# Altium footprint library UCP.PcbLib: 222 footprints (part 3 of 14)
Each footprint in its own frame and in the unit in brackets; x right, y up, seen from the top. Pads: shape width x height; smd on the part's side, far side on the other; paste and mask are expansions set on the pad; w line width, h text height; cw(c..) or ccw(c..) is an arc to the next point about the centre after c.
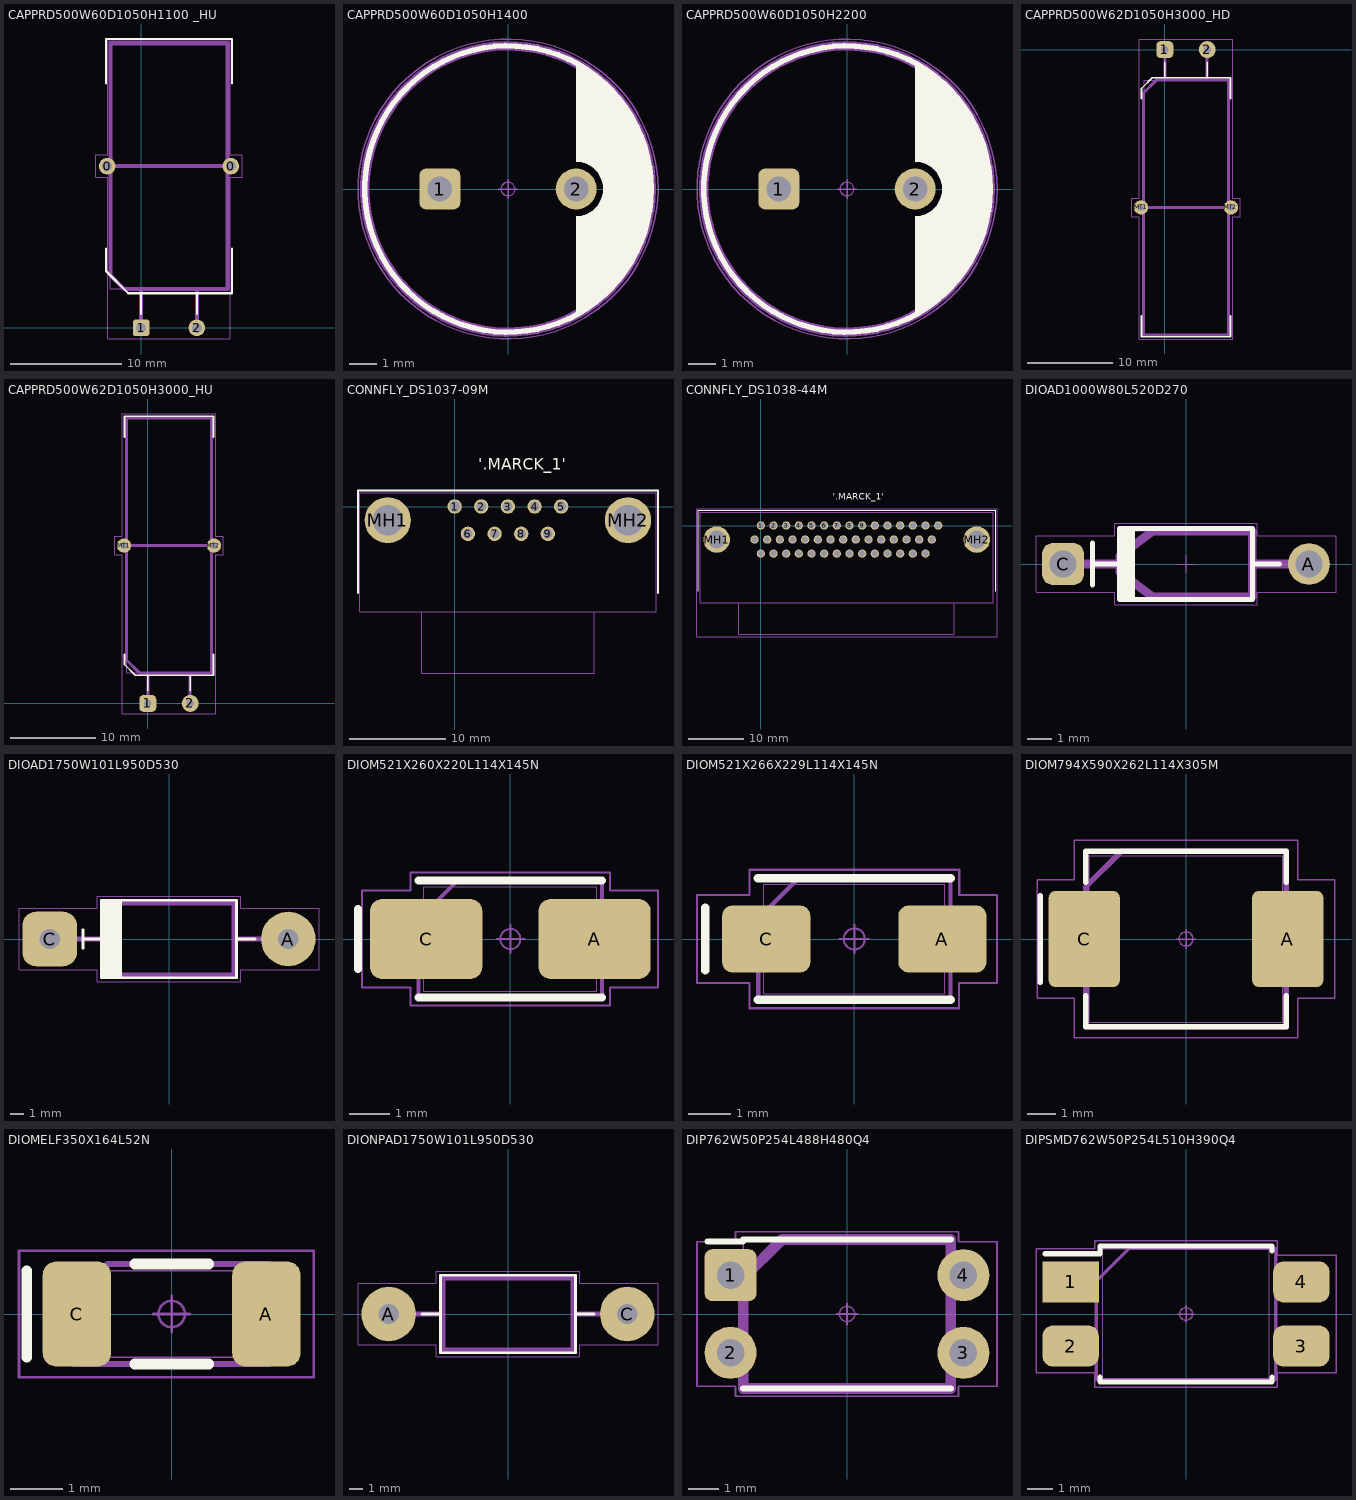
[diagram p2: the footprints below, top view; thin cyan lines are the x and y axes]

## CAPPRD500W60D1050H1100 _HU [mm] "Capacitor, Polarized, Radial (Electrolytic); 5.00 mm C X 10.50 mm Dia X 22.00 mm H body"
height 11
pads (4):
  round 1.5 hole 0.9 paste-1.5: 0(-3.05,14.5) 0(8.05,14.5) 2(5,0)
  rrect33% 1.5x1.5 hole 0.9 paste-1.5: 1(0,0)
Top Overlay:
  lines w0.2: -3.15,7.1 -3.15,5.1 -1.15,3.1 8.15,3.1 8.15,7.1 ; -3.15,21.9 -3.15,25.9 8.15,25.9 8.15,21.9 ; 0,1.25 0,3.1 ; 5,1.25 5,3.1
Top Designator:
  text ".Designator" at -4.511,-0.453 h2
Top Assembly:
  lines w0.35: -3.05,14.5 8.05,14.5 ; 0,0 0,3.487 ; 5,0 5,3.487 ; -2.75,4.7 -2.75,25.5 7.75,25.5 7.75,3.5 -1.55,3.5 -2.75,4.7
Top Courtyard:
  circle w0.05: c0,0 r0.25
  lines w0.05: -0.35,0 0.35,0 ; 0,-0.35 0,0.35 ; -4.05,13.5 -4.05,15.5 -3,15.5 -3,25.75 8,25.75 8,15.5 9.05,15.5 9.05,13.5 8,13.5 8,-1 -3,-1 -3,13.5 -4.05,13.5
Top Component Outline:
  lines w0.05: -2.75,3.5 -2.75,25.5 7.75,25.5 7.75,3.5 -2.75,3.5
Top Component Terminal:
  circle w0.05: c0,0 r0.325
  circle w0.05: c5,0 r0.325
3D body "CAPPRD500W60D1050H1100_HU.stp": height 11.1, standoff -3.5, extent -3.348,-0.299 8.348,25.51

## CAPPRD500W60D1050H1400 [mm] "Capacitor, Polarized, Radial (Electrolytic); 5.00 mm C X 10.50 mm Dia X 14.00 mm H body"
height 14
pads (2):
  rrect33% 1.5x1.5 / inner round 1.5 / far side rrect33% 1.5x1.5 hole 0.9 paste-1.5: 1(-2.5,0)
  round 1.5 hole 0.9 paste-1.5: 2(2.5,0)
Top Overlay:
  circle w0.2: c0,0 r5.25
  region: 2.5,-4.6 2.809,-4.432 3.376,-4.017 3.883,-3.529 4.32,-2.978 4.68,-2.374 4.955,-1.727 5.141,-1.049 5.235,-0.352 5.235,0.352 5.141,1.049 4.955,1.727 4.68,2.374 4.32,2.978 3.883,3.529 3.376,4.017 2.809,4.432 2.5,4.6 2.5,1 2.631,0.991 2.883,0.924 3.109,0.793 3.293,0.609 3.424,0.383 3.491,0.131 3.491,-0.131 3.424,-0.383 3.293,-0.609 3.109,-0.793 2.883,-0.924 2.631,-0.991 2.5,-1
Top Designator:
  text ".Designator" at -4.511,-0.453 h2
Top Assembly:
  circle w0.35: c0,0 r5.25
Top Courtyard:
  circle w0.05: c0,0 r0.25
  circle w0.05: c0,0 r5.5
  lines w0.05: -0.35,0 0.35,0 ; 0,-0.35 0,0.35
Top Component Outline:
  circle w0.05: c0,0 r5.25
Top Component Terminal:
  circle w0.05: c2.5,0 r0.325
  circle w0.05: c-2.5,0 r0.325
3D body "CAPPRD500W60D1050H1400.STEP": height 14.01, standoff -2, extent -5.25,-5.25 5.26,5.25

## CAPPRD500W60D1050H2200 [mm] "Capacitor, Polarized, Radial (Electrolytic); 5.00 mm C X 10.50 mm Dia X 22.00 mm H body"
height 22
pads (2):
  rrect33% 1.5x1.5 hole 0.9 paste-1.5: 1(-2.5,0)
  round 1.5 hole 0.9 paste-1.5: 2(2.5,0)
Top Overlay:
  circle w0.2: c0,0 r5.25
  region: 2.5,-4.6 2.809,-4.432 3.376,-4.017 3.883,-3.529 4.32,-2.978 4.68,-2.374 4.955,-1.727 5.141,-1.049 5.235,-0.352 5.235,0.352 5.141,1.049 4.955,1.727 4.68,2.374 4.32,2.978 3.883,3.529 3.376,4.017 2.809,4.432 2.5,4.6 2.5,1 2.631,0.991 2.883,0.924 3.109,0.793 3.293,0.609 3.424,0.383 3.491,0.131 3.491,-0.131 3.424,-0.383 3.293,-0.609 3.109,-0.793 2.883,-0.924 2.631,-0.991 2.5,-1
Top Designator:
  text ".Designator" at -4.511,-0.453 h2
Top Assembly:
  circle w0.35: c0,0 r5.25
Top Courtyard:
  circle w0.05: c0,0 r5.5
  circle w0.05: c0,0 r0.25
  lines w0.05: -0.35,0 0.35,0 ; 0,-0.35 0,0.35
Top Component Outline:
  circle w0.05: c0,0 r5.25
Top Component Terminal:
  circle w0.05: c-2.5,0 r0.325
  circle w0.05: c2.5,0 r0.325
3D body "CAPPRD500W60D1050H2200.STEP": height 22.01, standoff -2, extent -5.25,-5.25 5.26,5.25

## CAPPRD500W62D1050H3000_HD [mm] "Capacitor, Polarized, Radial (Electrolytic); 5.00 mm C X 10.00 mm Dia X 30.00 mm H body"
height 11
pads (4):
  rrect50% 2x2 hole 0.9: 1(0,0)
  round 2 hole 0.9: 2(5,0)
  round 1.7 hole 0.8: MT1(-2.8,-18.6) MT2(7.8,-18.6)
Top Overlay:
  lines w0.2: -2.75,-31.35 -2.75,-33.85 7.75,-33.85 7.75,-31.35 ; -2.75,-5.8 -2.75,-4.58 -1.47,-3.3 7.75,-3.3 7.75,-5.8 ; 0,-3.3 0,-1.5 ; 5,-3.3 5,-1.5
Top Designator:
  text ".Designator" at -4.511,-0.453 h2
Top Assembly:
  lines w0.35: -2.8,-18.6 7.8,-18.6 ; 0,-3.6 0,0 ; 5,-3.6 5,0 ; -2.5,-33.6 -2.5,-5.1 -1,-3.6 7.5,-3.6 7.5,-33.6 -2.5,-33.6
Top Courtyard:
  lines w0.05: -3.9,-19.7 -3,-19.7 -3,-34.1 8,-34.1 8,-19.7 8.9,-19.7 8.9,-17.5 8,-17.5 8,1.25 -3,1.25 -3,-17.5 -3.9,-17.5 -3.9,-19.7
Top Component Outline:
  lines w0.05: -2.5,-33.6 7.5,-33.6 7.5,-3.6 -2.5,-3.6 -2.5,-33.6
Top Component Terminal:
  circle w0.025: c5,0 r0.35
  circle w0.025: c0,0 r0.35
3D body "CAPPRD500W62D1050H3200_HD.stp": height 10, standoff -3.5, extent -2.5,-33.6 7.5,0.299
3D body "Staple.stp": height 10.6, standoff -2, extent -3.098,-18.899 8.097,-18.301

## CAPPRD500W62D1050H3000_HU [mm] "Capacitor, Polarized, Radial (Electrolytic); 5.00 mm C X 10.00 mm Dia X 30.00 mm H body"
height 11
pads (4):
  rrect50% 2x2 hole 0.9: 1(0,0)
  round 2 hole 0.9: 2(5,0)
  round 1.7 hole 0.8: MT1(-2.8,18.6) MT2(7.8,18.6)
Top Overlay:
  lines w0.2: -2.75,5.8 -2.75,4.58 -1.47,3.3 7.75,3.3 7.75,5.8 ; -2.75,31.35 -2.75,33.85 7.75,33.85 7.75,31.35 ; 0,1.5 0,3.3 ; 5,1.5 5,3.3
Top Designator:
  text ".Designator" at -4.511,-0.453 h2
Top Assembly:
  lines w0.35: -2.8,18.6 7.8,18.6 ; 0,0 0,3.6 ; 5,0 5,3.6 ; -2.5,5.1 -1,3.6 7.5,3.6 7.5,33.6 -2.5,33.6 -2.5,5.1
Top Courtyard:
  lines w0.05: -3.9,17.5 -3.9,19.7 -3,19.7 -3,34.1 8,34.1 8,19.7 8.9,19.7 8.9,17.5 8,17.5 8,-1.25 -3,-1.25 -3,17.5 -3.9,17.5
Top Component Outline:
  lines w0.05: -2.5,3.6 -2.5,33.6 7.5,33.6 7.5,3.6 -2.5,3.6
Top Component Terminal:
  circle w0.025: c0,0 r0.35
  circle w0.025: c5,0 r0.35
3D body "CAPPRD500W62D1050H3200.stp": height 10, standoff -3.5, extent -2.5,-0.299 7.5,33.6
3D body "Staple.stp": height 10.6, standoff -2, extent -3.098,18.301 8.098,18.899

## CONNFLY_DS1037-09M [mm]
pads (11):
  round 1.5 hole 1.1: 1(0,0)
  round 1.5 hole 1: 2(2.772,0) 3(5.544,0) 4(8.316,0) 5(11.088,0) 6(1.386,-2.84) 7(4.158,-2.84) 8(6.93,-2.84) 9(9.702,-2.84)
  round 4.8 hole 3.2: MH1(-6.951,-1.42) MH2(18.039,-1.42)
Top Overlay:
  lines w0.2: -10.046,-9 -10.046,1.65 21.154,1.65 21.154,-9
  text "'.MARCK_1'" at 2.485,3.382 h2
Top Assembly:
  lines w0.05: -3.396,-10.943 -3.396,-17.34 14.504,-17.34 14.504,-10.943 ; -9.846,-10.94 -9.846,1.45 20.954,1.45 20.954,-10.94 -9.846,-10.94
3D body "DS1037-09M.stp": height 12.5, standoff -4.4, extent -9.86,-17.04 20.94,1.46

## CONNFLY_DS1038-44M [mm]
pads (46):
  round 1.5 hole 1.1: 1(0,0) 2(2.29,0) 3(4.58,0) 4(6.87,0) 5(9.16,0) 6(11.45,0) 7(13.74,0) 8(16.03,0) 9(18.32,0) 10(20.61,0) 11(22.9,0) 12(25.19,0) 13(27.48,0) 14(29.77,0) 15(32.06,0) 16(-1.145,-2.54) 17(1.145,-2.54) 18(3.435,-2.54) 19(5.725,-2.54) 20(8.015,-2.54) 21(10.305,-2.54) 22(12.595,-2.54) 23(14.885,-2.54) 24(17.175,-2.54) 25(19.465,-2.54) 26(21.755,-2.54) 27(24.045,-2.54) 28(26.335,-2.54) 29(28.625,-2.54) 30(30.915,-2.54) 31(0,-5.08) 32(2.29,-5.08) 33(4.58,-5.08) 34(6.87,-5.08) 35(9.16,-5.08) 36(11.45,-5.08) 37(13.74,-5.08) 38(16.03,-5.08) 39(18.32,-5.08) 40(20.61,-5.08) 41(22.9,-5.08) 42(25.19,-5.08) 43(27.48,-5.08) 44(29.77,-5.08)
  round 4.8 hole 3.2: MH1(-8,-2.54) MH2(39.04,-2.54)
Top Overlay:
  lines w0.2: -11.35,-11.9 -11.35,2.75 42.45,2.75 42.45,-11.9
  text "'.MARCK_1'" at 13.015,4.182 h2
Top Assembly:
  lines w0.2: -3.96,-13.97 -3.96,-19.67 35,-19.67 35,-13.97 ; -11,-13.97 -11,2.4 42.04,2.4 42.04,-13.97 -11,-13.97
Top Courtyard:
  lines w0.1: -11.55,-20.1 42.7,-20.1 42.7,3 -11.55,3 -11.55,-20.1
Top Component Outline:
  lines w0.2: -3.96,-13.97 -3.96,-19.67 35,-19.67 35,-13.97 ; -11,-13.97 -11,2.4 42.04,2.4 42.04,-13.97 -11,-13.97
Top Component Terminal:
  drawing of 184 lines, arcs and shapes, not listed
Bottom Component Terminal:
  drawing of 184 lines, arcs and shapes, not listed
3D body "DS1038-44M.stp": height 12.5, standoff -4.5, extent -11,-19.81 42.04,2.39

## DIOAD1000W80L520D270 [mm]
height 2.7
pads (2):
  round 1.7 hole 1.1: A(5,0)
  rrect50% 1.7x1.7 hole 1.1: C(-5,0)
Top Overlay:
  rectangle: -2.7,-1.45 -2.075,1.45
  lines w0.2: -3.8,-0.85 -3.8,0.85 ; -3.8,0 -2.7,0 ; 2.7,0 3.8,0 ; -2.7,-1.45 -2.7,1.45 2.7,1.45 2.7,-1.45 -2.7,-1.45
Top Assembly:
  lines w0.35: -5,0 -2.7,0 ; 2.7,0 5,0 ; -2.7,-0.331 -1.375,-1.325 2.7,-1.325 2.7,1.325 -1.375,1.325 -2.7,0.331 -2.7,-0.331
Top Courtyard:
  lines w0.05: -0.35,0 0.35,0 ; 0,-0.35 0,0.35 ; 2.9,-1.175 2.9,-1.65 -2.9,-1.65 -2.9,-1.15 -6.1,-1.15 -6.1,1.15 -2.9,1.15 -2.9,1.65 2.9,1.65 2.9,1.175 ; 2.9,-1.15 6.1,-1.15 6.1,1.15 2.9,1.15
Top Component Outline:
  lines w0.05: -2.6,-1.35 -2.6,1.35 2.6,1.35 2.6,-1.35 -2.6,-1.35
Top Component Terminal:
  circle w0.025: c5,0 r0.4
  circle w0.025: c-5,0 r0.4
3D body "DIOAD1000W80L520D270.stp": height 2.71, standoff -3.5, extent -5.397,-1.36 5.397,1.349

## DIOAD1750W101L950D530 [mm] "Diode, Non-polarized, Axial; 17.50 mm Pitch X 1.015 mm W 9.50 mm L X 5.30 mm Dia. body"
height 5.3
pads (2):
  round 4 hole 1.5: A(8.75,0)
  rrect50% 4x4 hole 1.5: C(-8.75,0)
Top Overlay:
  rectangle: -4.95,-2.85 -3.45,2.85
  lines w0.2: -6.3,-0.675 -6.3,0.675 ; -6.3,0 -4.95,0 ; 4.95,0 6.3,0 ; -4.95,-2.85 4.95,-2.85 4.95,2.85 -4.95,2.85 -4.95,-2.85
Top Assembly:
  lines w0.35: -8.75,0 -4.75,0 ; 4.75,0 8.75,0 ; -4.75,-1.65 -4.75,1.65 -3.75,2.65 4.75,2.65 4.75,-2.65 -3.75,-2.65 -4.75,-1.65
Top Courtyard:
  lines w0.05: -11,-2.25 -11,2.25 -5.25,2.25 -5.25,3.15 5.25,3.15 5.25,2.25 11,2.25 11,-2.25 5.25,-2.25 5.25,-3.15 -5.25,-3.15 -5.25,-2.25 -11,-2.25
Top Component Outline:
  lines w0.05: -4.75,-2.65 -4.75,2.65 4.75,2.65 4.75,-2.65 -4.75,-2.65
Top Component Terminal:
  circle w0.025: c8.75,0 r0.507
  circle w0.025: c-8.75,0 r0.507
3D body "DIOAD1750W101L950D270.stp": height 5.31, standoff -3.5, extent -9.271,-2.66 9.271,2.66

## DIOM521X260X220L114X145N [mm] "Diode, Molded Body; 4.315 mm L X 2.605 mm W X 2.20 mm H body"
height 2.2
pads (2):
  rrect30% 2.8x2 smd: A(2.1,0) C(-2.1,0)
Top Overlay:
  lines w0.2: -3.8,-0.75 -3.8,0.75 ; -2.29,-1.46 2.29,-1.46 ; -2.29,1.46 2.29,1.46
Top Designator:
  text ".Designator" at -4.511,-0.453 h2
Top Assembly:
  lines w0.1: -2.29,-1.46 -2.29,0.487 -1.317,1.46 2.29,1.46 2.29,-1.46 -2.29,-1.46
Top Courtyard:
  circle w0.05: c0,0 r0.25
  lines w0.05: -0.35,0 0.35,0 ; 0,-0.35 0,0.35 ; -3.704,-1.207 -3.704,1.204 -2.49,1.204 -2.49,1.66 2.49,1.66 2.49,1.207 3.683,1.207 3.683,-1.211 2.49,-1.211 2.49,-1.66 -2.49,-1.66 -2.49,-1.207 -3.704,-1.207
Top Component Outline:
  lines w0.025: -2.157,-1.302 -2.157,1.302 2.157,1.302 2.157,-1.302 -2.157,-1.302
Top Component Terminal:
  lines w0.025: -2.8,-0.725 -0.8,-0.725 -0.8,0.725 -2.8,0.725 -2.8,-0.725 ; 0.8,-0.725 0.8,0.725 2.8,0.725 2.8,-0.725 0.8,-0.725
3D body "DIOM521X260X220L114X145.STEP": height 2.2, standoff 0, extent -2.605,-1.302 2.605,1.303

## DIOM521X266X229L114X145N [mm] "Diode, Molded Body; 4.315 mm L X 2.605 mm W X 2.29 mm H body"
height 2.29
pads (2):
  rrect30% 2.1x1.6 smd: A(2.1,0) C(-2.1,0)
Top Overlay:
  lines w0.2: -3.55,-0.75 -3.55,0.75 ; -2.3,-1.45 2.3,-1.45 ; -2.3,1.45 2.3,1.45
Top Designator:
  text ".Designator" at -4.511,-0.453 h2
Top Assembly:
  lines w0.1: -2.29,-1.46 2.29,-1.46 2.29,1.46 -1.317,1.46 -2.29,0.487 -2.29,-1.46
Top Courtyard:
  circle w0.05: c0,0 r0.25
  lines w0.05: -0.35,0 0.35,0 ; 0,-0.35 0,0.35 ; -3.75,-1.05 -2.5,-1.05 -2.5,-1.65 2.49,-1.65 2.49,-1.05 3.4,-1.05 3.4,1.05 2.5,1.05 2.5,1.65 -2.5,1.65 -2.5,1.05 -3.75,1.05 -3.75,-1.05
Top Component Outline:
  lines w0.025: -2.157,-1.302 2.157,-1.302 2.157,1.302 -2.157,1.302 -2.157,-1.302
Top Component Terminal:
  lines w0.025: -2.55,-0.725 -2.55,0.725 -1.41,0.725 -1.41,-0.725 -2.55,-0.725 ; 1.41,-0.725 2.55,-0.725 2.55,0.725 1.41,0.725 1.41,-0.725
3D body "DIOM521X260X220L114X145.STEP": height 2.2, standoff 0, extent -2.605,-1.302 2.605,1.303

## DIOM794X590X262L114X305M [mm] "Diode, Molded Body; 6.855 mm L X 5.905 mm W X 2.62 mm H body"
height 2.62
pads (2):
  rrect20% 2.53x3.42 smd: A(3.61,0) C(-3.61,0)
Top Overlay:
  lines w0.2: -5.175,-1.53 -5.175,1.53 ; -3.56,-2.01 -3.56,-3.11 3.56,-3.11 3.56,-2.01 ; -3.56,2.01 -3.56,3.11 3.56,3.11 3.56,2.01
Top Designator:
  text ".Designator" at -4.511,-0.453 h2
Top Assembly:
  lines w0.2: -3.56,-3.11 -3.56,1.84 -2.29,3.11 3.56,3.11 3.56,-3.11 -3.56,-3.11
Top Courtyard:
  circle w0.05: c0,0 r0.25
  lines w0.05: -0.35,0 0.35,0 ; 0,-0.35 0,0.35 ; -5.275,-2.11 -5.275,2.11 -3.96,2.11 -3.96,3.51 3.96,3.51 3.96,2.11 5.275,2.11 5.275,-2.11 3.96,-2.11 3.96,-3.51 -3.96,-3.51 -3.96,-2.11 -5.275,-2.11
Top Component Outline:
  lines w0.025: -3.427,-2.953 -3.427,2.953 3.427,2.953 3.427,-2.953 -3.427,-2.953
Top Component Terminal:
  lines w0.025: -3.97,-1.525 -2.83,-1.525 -2.83,1.525 -3.97,1.525 -3.97,-1.525 ; 2.83,-1.525 2.83,1.525 3.97,1.525 3.97,-1.525 2.83,-1.525
3D body "DIOM794X590X262L114X305.stp": height 2.62, standoff 0, extent -3.97,-2.953 3.97,2.952

## DIOMELF350X164L52N [mm] "Diode, Metal Electrode Leadless Face (MELF); 3.50 mm L X 1.645 mm Dia body"
height 1.89
pads (2):
  rrect40% 1.3x2 smd: A(1.8,0) C(-1.8,0)
Top Overlay:
  lines w0.2: -2.755,-0.82 -2.755,0.82 ; -0.705,-0.95 0.705,-0.95 ; -0.705,0.95 0.705,0.95
Top Designator:
  text ".Designator" at -4.511,-0.453 h2
Top Assembly:
  lines w0.12: -1.85,-0.95 -1.85,0.317 -1.217,0.95 1.85,0.95 1.85,-0.95 -1.85,-0.95
Top Courtyard:
  circle w0.05: c0,0 r0.25
  lines w0.05: -0.35,0 0.35,0 ; 0,-0.35 0,0.35 ; -2.9,-1.2 -2.9,1.2 2.7,1.2 2.7,-1.2 -2.9,-1.2
Top Component Outline:
  lines w0.025: -1.75,-0.823 -1.75,0.823 1.75,0.823 1.75,-0.823 -1.75,-0.823
Top Component Terminal:
  lines w0.025: -1.75,-0.823 -1.225,-0.823 -1.225,0.823 -1.75,0.823 -1.75,-0.823 ; 1.225,-0.823 1.225,0.823 1.75,0.823 1.75,-0.823 1.225,-0.823
3D body "DIOMELF350X164L52.STEP": height 1.65, standoff 0, extent -1.75,-0.822 1.75,0.823

## DIONPAD1750W101L950D530 [mm] "Diode, Non-polarized, Axial; 17.50 mm Pitch X 1.015 mm W 9.50 mm L X 5.30 mm Dia. body"
height 5.3
pads (2):
  round 4 hole 1.5: A(-8.75,0) C(8.75,0)
Top Overlay:
  lines w0.2: -6.3,0 -4.95,0 ; 4.95,0 6.3,0 ; -4.95,-2.85 -4.95,2.85 4.95,2.85 4.95,-2.85 -4.95,-2.85
Top Assembly:
  lines w0.35: -8.75,0 -4.75,0 ; 4.75,0 8.75,0 ; -4.75,-2.65 4.75,-2.65 4.75,2.65 -4.75,2.65 -4.75,-2.65
Top Courtyard:
  lines w0.05: -11,-2.25 -5.25,-2.25 -5.25,-3.15 5.25,-3.15 5.25,-2.25 11,-2.25 11,2.25 5.25,2.25 5.25,3.15 -5.25,3.15 -5.25,2.25 -11,2.25 -11,-2.25
Top Component Outline:
  lines w0.05: -4.75,-2.65 4.75,-2.65 4.75,2.65 -4.75,2.65 -4.75,-2.65
Top Component Terminal:
  circle w0.025: c-8.75,0 r0.507
  circle w0.025: c8.75,0 r0.507
3D body "DIONPAD1750W101L950D270.stp": height 5.3, standoff -3.5, extent -9.271,-2.65 9.271,2.65

## DIP762W50P254L488H480Q4 [mm] "DIP, 7.62 mm lead span, 2.54 mm pitch; 4 pin, 4.88 mm L X 6.80 mm W X 4.80 mm H body"
height 4.8
pads (4):
  rrect29% 1.7x1.7 / inner round 1.7 / far side rrect29% 1.7x1.7 hole 0.9 paste-1.7: 1(-3.81,1.27)
  round 1.7 hole 0.9 paste-1.7: 2(-3.81,-1.27) 3(3.81,-1.27) 4(3.81,1.27)
Top Overlay:
  lines w0.2: -4.56,2.37 -3.4,2.37 ; -3.4,-2.44 3.4,-2.44 ; -3.4,2.44 3.4,2.44
Top Designator:
  text ".Designator" at -4.511,-0.453 h2
Top Assembly:
  lines w0.35: -3.4,-2.44 -3.4,1.17 -2.13,2.44 3.4,2.44 3.4,-2.44 -3.4,-2.44
Top Courtyard:
  circle w0.05: c0,0 r0.25
  lines w0.05: -0.35,0 0.35,0 ; 0,-0.35 0,0.35 ; -4.91,-2.37 -4.91,2.37 -3.65,2.37 -3.65,2.69 3.65,2.69 3.65,2.37 4.91,2.37 4.91,-2.37 3.65,-2.37 3.65,-2.69 -3.65,-2.69 -3.65,-2.37 -4.91,-2.37
Top Component Outline:
  lines w0.05: -3.4,-2.44 3.4,-2.44 3.4,2.44 -3.4,2.44 -3.4,-2.44
Top Component Terminal:
  lines w0.05: -3.96,-1.57 -3.96,-0.97 -3.66,-0.97 -3.66,-1.57 -3.96,-1.57 ; -3.96,0.97 -3.96,1.57 -3.66,1.57 -3.66,0.97 -3.96,0.97 ; 3.66,-1.57 3.66,-0.97 3.96,-0.97 3.96,-1.57 3.66,-1.57 ; 3.66,0.97 3.66,1.57 3.96,1.57 3.96,0.97 3.66,0.97
3D body "DIP762W50P254L488H480Q4.STEP": height 4.8, standoff -2, extent -3.935,-2.44 3.935,2.44

## DIPSMD762W50P254L510H390Q4 [mm] "DIP, 7.62 mm lead span, 2.54 mm pitch; 4 pin, 5.10 mm L X 6.50 mm W X 3.90 mm H body"
height 3.9
pads (4):
  rect 2.2x1.6 smd: 1(-4.5,1.25)
  rrect50% 2.2x1.6 smd: 2(-4.5,-1.25) 3(4.5,-1.25) 4(4.5,1.25)
Top Overlay:
  lines w0.2: -5.5,2.35 -3.35,2.35 -3.35,2.65 3.35,2.65 3.35,2.45 ; -3.35,-2.45 -3.35,-2.65 3.35,-2.65 3.35,-2.45
Top Designator:
  text ".Designator" at -4.511,-0.453 h2
Top Assembly:
  lines w0.12: -3.5,-2.55 3.5,-2.55 3.5,2.55 -2.23,2.55 -3.5,1.28 -3.5,-2.55
Top Courtyard:
  circle w0.05: c0,0 r0.25
  lines w0.05: -0.35,0 0.35,0 ; 0,-0.35 0,0.35 ; -5.85,-2.3 -3.55,-2.3 -3.55,-2.85 3.55,-2.85 3.55,-2.3 5.85,-2.3 5.85,2.3 3.55,2.3 3.55,2.85 -3.55,2.85 -3.55,2.55 -5.85,2.55 -5.85,-2.3
Top Component Outline:
  lines w0.025: -3.25,-2.55 -3.25,2.55 3.25,2.55 3.25,-2.55 -3.25,-2.55
Top Component Terminal:
  lines w0.025: -5.08,-1.92 -4.08,-1.92 -4.08,-0.62 -5.08,-0.62 -5.08,-1.92 ; -5.08,0.62 -4.08,0.62 -4.08,1.92 -5.08,1.92 -5.08,0.62 ; 4.08,-1.92 5.08,-1.92 5.08,-0.62 4.08,-0.62 4.08,-1.92 ; 4.08,0.62 5.08,0.62 5.08,1.92 4.08,1.92 4.08,0.62
3D body "DIPSMD762W50P254L510H400Q4.stp": height 4.6, standoff 0, extent -5.23,-2.55 5.23,2.55